# Altium schematic symbol library FE1.1S_SSOP-28.SchLib: 1 symbol
Pins are listed as number, name and electrical type; pins without a type are passive.

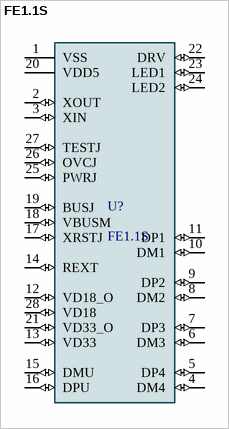
[diagram p0: symbol FE1.1S]

## FE1.1S
designator U?
FE1.1S / USB 2.0 HIGH SPEED 4-PORT HUB CONTROLLER / 28-pin SSOP; MF: terminus; Check_prices: https://www.snapeda.com/parts/FE1.1S/Terminus-Tech/view-part/?ref=eda; Package: None; Availability: Not in stock; Value: *; MP: FE1.1S; SnapEDA_Link: https://www.snapeda.com/parts/FE1.1S/Terminus-Tech/view-part/?ref=snap; Price: None
footprint FE1.1S_SSOP-28
pins: 1 VSS (power), 2 XOUT (io), 3 XIN (io), 4 DM4 (io), 5 DP4 (io), 6 DM3 (io), 7 DP3 (io), 8 DM2 (io), 9 DP2 (io), 10 DM1 (io), 11 DP1 (io), 12 VD18_O (io), 13 VD33 (io), 14 REXT (io), 15 DMU (io), 16 DPU (io), 17 XRSTJ (io), 18 VBUSM (io), 19 BUSJ (io), 20 VDD5 (power), 21 VD33_O (io), 22 DRV (io), 23 LED1 (io), 24 LED2 (io), 25 PWRJ (io), 26 OVCJ (io), 27 TESTJ (io), 28 VD18 (io)